# Altium schematic symbol library eGPU_Components.SchLib: 2 symbols
Pins are listed as number, name and electrical type; pins without a type are passive.

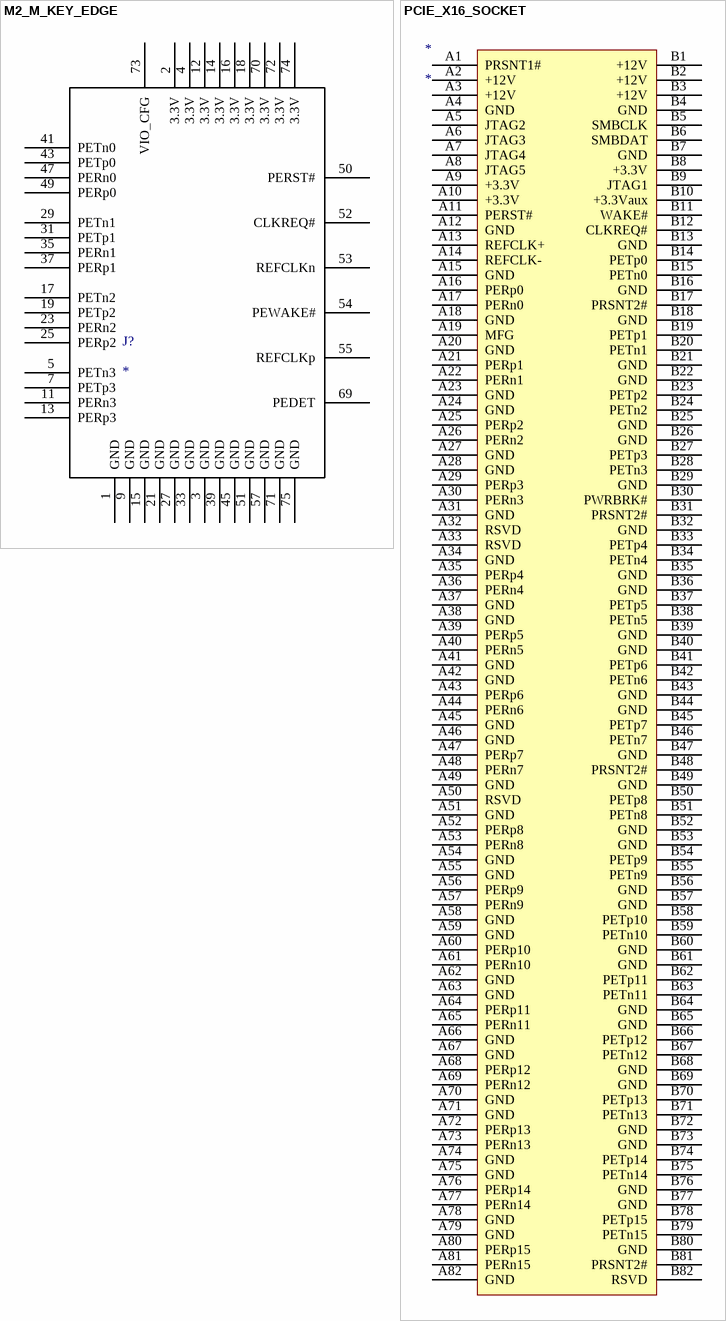
[diagram p0: symbols M2_M_KEY_EDGE to PCIE_X16_SOCKET]

## M2_M_KEY_EDGE
designator J?
pins: 1 GND, 2 3.3V, 3 GND, 4 3.3V, 5 PETn3, 7 PETp3, 9 GND, 11 PERn3, 12 3.3V, 13 PERp3, 14 3.3V, 15 GND, 16 3.3V, 17 PETn2, 18 3.3V, 19 PETp2, 21 GND, 23 PERn2, 25 PERp2, 27 GND, 29 PETn1, 31 PETp1, 33 GND, 35 PERn1, 37 PERp1, 39 GND, 41 PETn0, 43 PETp0, 45 GND, 47 PERn0, 49 PERp0, 50 PERST#, 51 GND, 52 CLKREQ#, 53 REFCLKn, 54 PEWAKE#, 55 REFCLKp, 57 GND, 69 PEDET, 70 3.3V, 71 GND, 72 3.3V, 73 VIO_CFG, 74 3.3V, 75 GND

## PCIE_X16_SOCKET
designator *
footprint AMPHENOL_10146065-113Y0LF
pins: A1 PRSNT1#, A2 +12V, A3 +12V, A4 GND, A5 JTAG2, A6 JTAG3, A7 JTAG4, A8 JTAG5, A9 +3.3V, A10 +3.3V, A11 PERST#, A12 GND, A13 REFCLK+, A14 REFCLK-, A15 GND, A16 PERp0, A17 PERn0, A18 GND, A19 MFG, A20 GND, A21 PERp1, A22 PERn1, A23 GND, A24 GND, A25 PERp2, A26 PERn2, A27 GND, A28 GND, A29 PERp3, A30 PERn3, A31 GND, A32 RSVD, A33 RSVD, A34 GND, A35 PERp4, A36 PERn4, A37 GND, A38 GND, A39 PERp5, A40 PERn5, A41 GND, A42 GND, A43 PERp6, A44 PERn6, A45 GND, A46 GND, A47 PERp7, A48 PERn7, A49 GND, A50 RSVD, A51 GND, A52 PERp8, A53 PERn8, A54 GND, A55 GND, A56 PERp9, A57 PERn9, A58 GND, A59 GND, A60 PERp10, A61 PERn10, A62 GND, A63 GND, A64 PERp11, A65 PERn11, A66 GND, A67 GND, A68 PERp12, A69 PERn12, A70 GND, A71 GND, A72 PERp13, A73 PERn13, A74 GND, A75 GND, A76 PERp14, A77 PERn14, A78 GND, A79 GND, A80 PERp15, A81 PERn15, A82 GND, B1 +12V, B2 +12V, B3 +12V, B4 GND, B5 SMBCLK, B6 SMBDAT, B7 GND, B8 +3.3V, B9 JTAG1, B10 +3.3Vaux, B11 WAKE#, B12 CLKREQ#, B13 GND, B14 PETp0, B15 PETn0, B16 GND, B17 PRSNT2#, B18 GND, B19 PETp1, B20 PETn1, B21 GND, B22 GND, B23 PETp2, B24 PETn2, B25 GND, B26 GND, B27 PETp3, B28 PETn3, B29 GND, B30 PWRBRK#, B31 PRSNT2#, B32 GND, B33 PETp4, B34 PETn4, B35 GND, B36 GND, B37 PETp5, B38 PETn5, B39 GND, B40 GND, B41 PETp6, B42 PETn6, B43 GND, B44 GND, B45 PETp7, B46 PETn7, B47 GND, B48 PRSNT2#, B49 GND, B50 PETp8, B51 PETn8, B52 GND, B53 GND, B54 PETp9, B55 PETn9, B56 GND, B57 GND, B58 PETp10, B59 PETn10, B60 GND, B61 GND, B62 PETp11, B63 PETn11, B64 GND, B65 GND, B66 PETp12, B67 PETn12, B68 GND, B69 GND, B70 PETp13, B71 PETn13, B72 GND, B73 GND, B74 PETp14, B75 PETn14, B76 GND, B77 GND, B78 PETp15, B79 PETn15, B80 GND, B81 PRSNT2#, B82 RSVD